# Altium footprint library 744878004.PcbLib: 3 footprints
Each footprint in its own frame and in the unit in brackets; x right, y up, seen from the top. Pads: shape width x height; smd on the part's side, far side on the other; paste and mask are expansions set on the pad; w line width, h text height; cw(c..) or ccw(c..) is an arc to the next point about the centre after c.
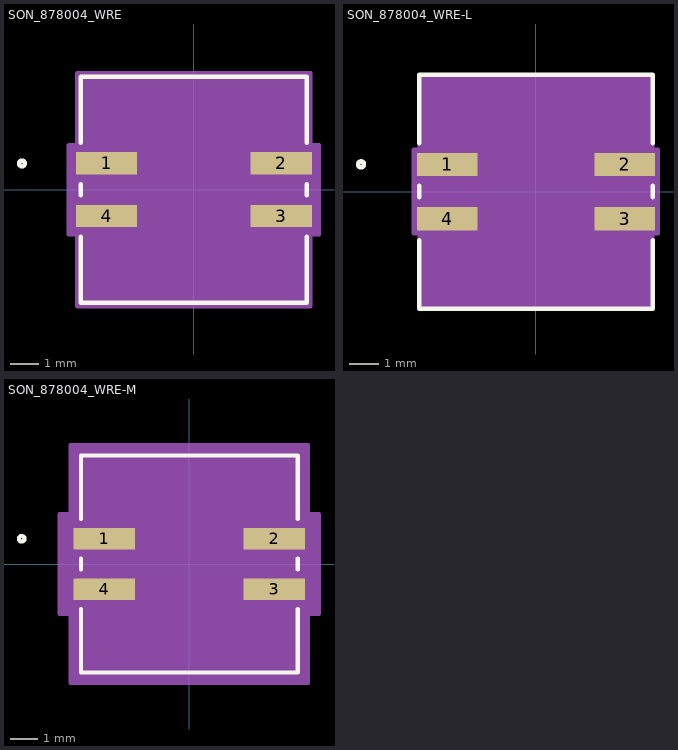
[diagram p0: the footprints below, top view; thin cyan lines are the x and y axes]

## SON_878004_WRE [mm]
pads (4):
  rect 2.154x0.788 smd paste+0 mask+0: 1(-3.071,0.925) 2(3.071,0.925) 3(3.071,-0.925) 4(-3.071,-0.925)
Top Overlay:
  circle w0.152: c-6.049,0.925 r0.102
  lines w0.152: -3.975,-1.652 -3.975,-3.975 3.975,-3.975 3.975,-1.652 ; -3.975,-0.198 -3.975,0.198 ; -3.975,1.652 -3.975,3.975 3.975,3.975 3.975,1.652 ; 3.975,-0.198 3.975,0.198
  text ".Designator" at -3.492,-0.635 h1.27
Mechanical 13:
  circle w0.025: c-1.994,0.925 r0.076
  lines w0.025: -0.305,3.848 ccw(c0,3.848) 0.305,3.848 ; -3.848,-3.848 3.848,-3.848 3.848,3.848 -3.848,3.848 -3.848,-3.848
  text ".Designator" at -3.492,-0.635 h1.27
Mechanical 15:
  region: -4.102,-1.573 -4.402,-1.573 -4.402,1.573 -4.102,1.573 -4.102,4.102 4.102,4.102 4.102,1.573 4.402,1.573 4.402,-1.573 4.102,-1.573 4.102,-4.102 -4.102,-4.102
  lines w0.152: -4.402,-1.573 -4.402,1.573 -4.102,1.573 -4.102,4.102 4.102,4.102 4.102,1.573 4.402,1.573 4.402,-1.573 4.102,-1.573 4.102,-4.102 -4.102,-4.102 -4.102,-1.573 -4.402,-1.573
3D body "SON_878004_WRE.step": height 3.99, standoff 0, extent -3.848,-3.848 3.848,3.848

## SON_878004_WRE-L [mm]
pads (4):
  rect 2.054x0.788 smd paste+0 mask+0: 1(-3.021,0.925) 2(3.021,0.925) 3(3.021,-0.925) 4(-3.021,-0.925)
Top Overlay:
  circle w0.152: c-5.949,0.925 r0.102
  lines w0.152: -3.975,-1.652 -3.975,-3.975 3.975,-3.975 3.975,-1.652 ; -3.975,-0.198 -3.975,0.198 ; -3.975,1.652 -3.975,3.975 3.975,3.975 3.975,1.652 ; 3.975,-0.198 3.975,0.198
  text ".Designator" at -3.492,-0.635 h1.27
Mechanical 13:
  circle w0.025: c-1.994,0.925 r0.076
  lines w0.025: -0.305,3.848 ccw(c0,3.848) 0.305,3.848 ; -3.848,-3.848 3.848,-3.848 3.848,3.848 -3.848,3.848 -3.848,-3.848
  text ".Designator" at -3.492,-0.635 h1.27
Mechanical 15:
  region: -3.95,-1.421 -4.15,-1.421 -4.15,1.421 -3.95,1.421 -3.95,3.95 3.95,3.95 3.95,1.421 4.15,1.421 4.15,-1.421 3.95,-1.421 3.95,-3.95 -3.95,-3.95
  lines w0.152: -4.15,-1.421 -4.15,1.421 -3.95,1.421 -3.95,3.95 3.95,3.95 3.95,1.421 4.15,1.421 4.15,-1.421 3.95,-1.421 3.95,-3.95 -3.95,-3.95 -3.95,-1.421 -4.15,-1.421
3D body "SON_878004_WRE.step": height 3.99, standoff 0, extent -3.848,-3.848 3.848,3.848

## SON_878004_WRE-M [mm]
pads (4):
  rect 2.254x0.788 smd paste+0 mask+0: 1(-3.121,0.925) 2(3.121,0.925) 3(3.121,-0.925) 4(-3.121,-0.925)
Top Overlay:
  circle w0.152: c-6.149,0.925 r0.102
  lines w0.152: -3.975,-1.652 -3.975,-3.975 3.975,-3.975 3.975,-1.652 ; -3.975,-0.198 -3.975,0.198 ; -3.975,1.652 -3.975,3.975 3.975,3.975 3.975,1.652 ; 3.975,-0.198 3.975,0.198
  text ".Designator" at -3.492,-0.635 h1.27
Mechanical 13:
  circle w0.025: c-1.994,0.925 r0.076
  lines w0.025: -0.305,3.848 ccw(c0,3.848) 0.305,3.848 ; -3.848,-3.848 3.848,-3.848 3.848,3.848 -3.848,3.848 -3.848,-3.848
  text ".Designator" at -3.492,-0.635 h1.27
Mechanical 15:
  region: -4.356,-1.827 -4.756,-1.827 -4.756,1.827 -4.356,1.827 -4.356,4.356 4.356,4.356 4.356,1.827 4.756,1.827 4.756,-1.827 4.356,-1.827 4.356,-4.356 -4.356,-4.356
  lines w0.152: -4.756,-1.827 -4.756,1.827 -4.356,1.827 -4.356,4.356 4.356,4.356 4.356,1.827 4.756,1.827 4.756,-1.827 4.356,-1.827 4.356,-4.356 -4.356,-4.356 -4.356,-1.827 -4.756,-1.827
3D body "SON_878004_WRE.step": height 3.99, standoff 0, extent -3.848,-3.848 3.848,3.848